# Altium schematic symbol library HSS 2026 Sematik Kutubhane.SchLib: 48 symbols
Pins are listed as number, name and electrical type; pins without a type are passive.

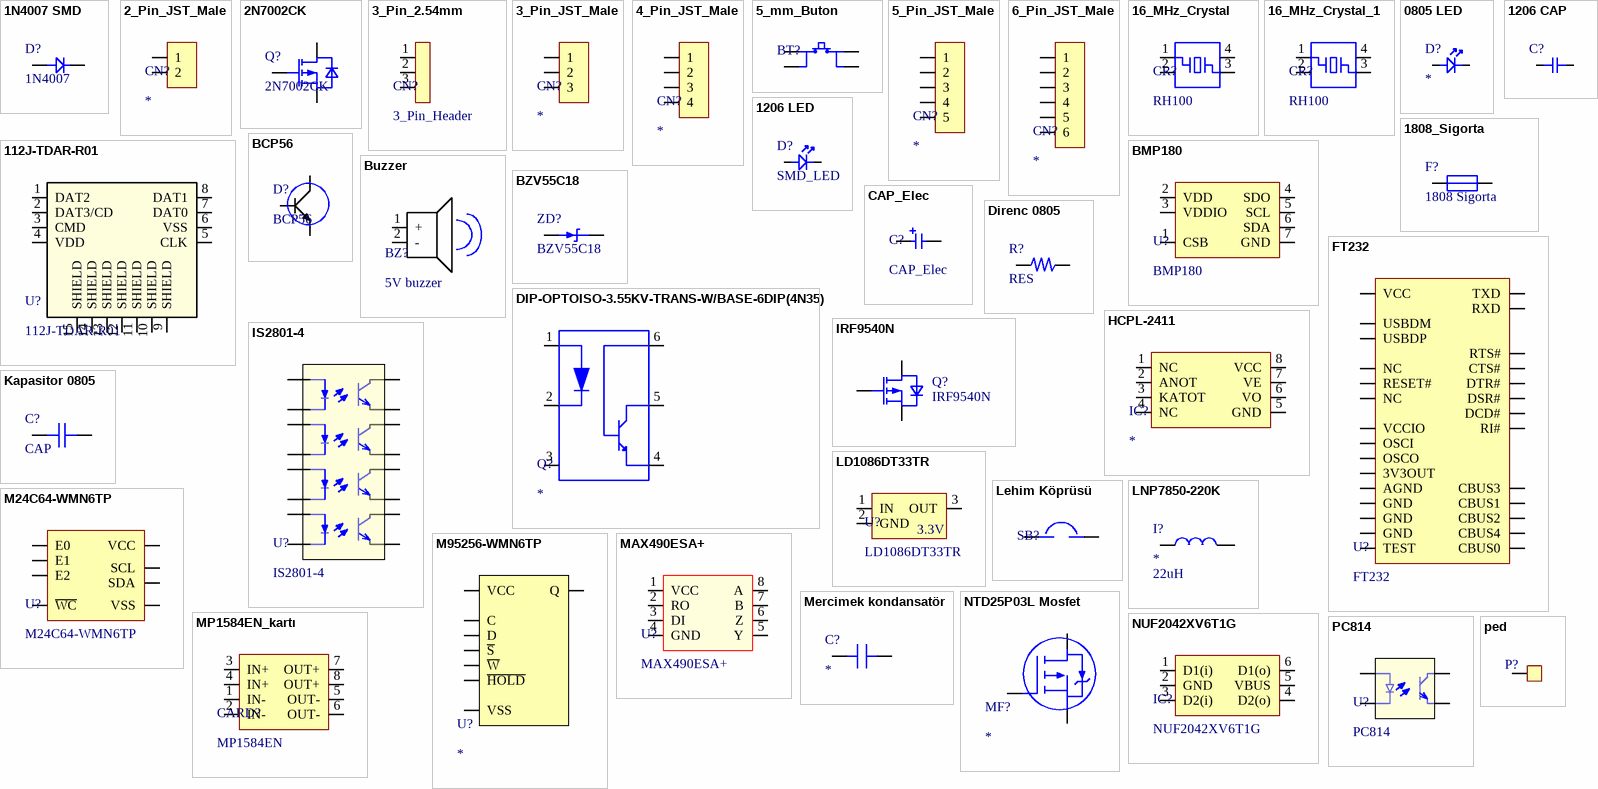
[diagram p0: symbols 1N4007 SMD to ped]

## 1N4007 SMD
designator D?, comment 1N4007
footprint SMB/DO-214AC
pins: 1, 2

## 2_Pin_JST_Male
designator CN?
footprint 2_Pin_JST_Male
pins: 1, 2

## 2N7002CK
designator Q?
footprint SOT-23TO-236_318-08_ONS
pins: 1 GATE, 2 DRAIN, 3 SOURCE

## 3_Pin_2.54mm
designator CN?, comment 3_Pin_Header
footprint 3_PIN_HEADER
pins: 1, 2, 3

## 3_Pin_JST_Male
designator CN?
footprint 3_Pin_JST_Male
pins: 1, 2, 3

## 4_Pin_JST_Male
designator CN?
footprint 4_Pin_JST_Male
pins: 1, 2, 3, 4

## 5_mm_Buton
designator BT?  (value not drawn)
footprint 5mm_buton
pins: 1, 2, 3, 4

## 5_Pin_JST_Male
designator CN?
footprint 5_Pin_JST_Male
pins: 1, 2, 3, 4, 5

## 6_Pin_JST_Male
designator CN?
footprint 6_Pin_JST_Male
pins: 1, 2, 3, 4, 5, 6

## 16_MHz_Crystal
designator CR?, comment RH100
footprint RH100
pins: 1, 2, 3, 4

## 16_MHz_Crystal_1
designator CR?, comment RH100
footprint RH100
pins: 1, 2, 3, 4

## 112J-TDAR-R01
designator U?
Description; Manufacturer_Name: Attend; Copyright: Copyright (C) 2025 Ultra Librarian. All rights reserved.; Manufacturer_Part_Number: 112J-TDAR-R01; RefDes: RefDes; Type: Type
footprint 112J-TDAR-R01_ATT
pins: 1 DAT2, 2 DAT3/CD, 3 CMD, 4 VDD, 5 CLK, 6 VSS, 7 DAT0, 8 DAT1, 9 SHIELD, 10 SHIELD, 11 SHIELD, 12 SHIELD, 13 SHIELD, 14 SHIELD, 15 SHIELD

## 0805 LED
designator D?
footprint 0805 LED
pins: 1, 2

## 1206 CAP
designator C?
footprint 1206_Kapasitör
pins: 1, 2

## 1206 LED
designator D?, comment SMD_LED
footprint 1206_LED
pins: 1, 2

## 1808_Sigorta
designator F?, comment 1808 Sigorta
footprint 1808_Sigorta
pins: 1, 2

## BCP56
designator D?
footprint SOT230P700X180-4N
pins: 1 B, 2 C, 3 E

## BMP180
designator U?
footprint BMP180
pins: 1 CSB, 2 VDD, 3 VDDIO, 4 SDO, 5 SCL, 6 SDA, 7 GND

## Buzzer
designator BZ?, comment 5V buzzer
footprint 5v buzer
pins: 1 +, 2 -

## BZV55C18
designator ZD?
footprint Zener_Diyot
pins: 1 A, 2 K

## CAP_Elec
designator C?
Value: *
footprint CAP_Elec
pins: 1, 2

## DIP-OPTOISO-3.55KV-TRANS-W/BASE-6DIP(4N35)
designator Q?
Optoisolator Transistor with Base Output 5000Vrms 1 Channel 6-DIP; MF: Vishay; MP: 4N35; Purchase-URL: https://pricing.snapeda.com/search/part/4N35/?ref=eda; Price: None; SnapEDA_Link: https://www.snapeda.com/parts/4N35/Vishay%20Semiconductor%20Opto%20Division/view-part/579099/?ref=snap; Availability: Good; Value: *; Check_prices: https://www.snapeda.com/parts/4N35/Vishay%20Semiconductor%20Opto%20Division/view-part/579099/?ref=eda; Package: DIP-6 Texas Instruments
footprint DIP6-2.54-7.3X6.5MM
pins: 1 ANODE, 2 CATHODE, 3 NC, 4 EMITER, 5 COLLECTOR, 6 BASE

## Direnc 0805
designator R?, comment RES
footprint 0805 Dırenc
pins: 1, 2

## FT232
designator U?
footprint SSOP-28
pins: 1 TXD, 2 DTR#, 3 RTS#, 4 VCCIO, 5 RXD, 6 RI#, 7 GND, 8 NC, 9 DSR#, 10 DCD#, 11 CTS#, 12 CBUS4, 13 CBUS2, 14 CBUS3, 15 USBDP, 16 USBDM, 17 3V3OUT, 18 GND, 19 RESET#, 20 VCC, 21 GND, 22 CBUS1, 23 CBUS0, 24 NC, 25 AGND, 26 TEST, 27 OSCI, 28 OSCO

## HCPL-2411
designator IC?
footprint DIP8-2.54
pins: 1 NC, 2 ANOT, 3 KATOT, 4 NC, 5 GND, 6 VO, 7 VE, 8 VCC

## IRF9540N
designator Q?
OptiMOS - P2 Power-Transistor, P-channel-Enhancement mode, VDS -30V; Manufacturer: Infineon Technologies; Manufacturer Order NumberManufacturer Order Number: IRF9540N; PackageReference: PG-TO220-3-904
footprint IFX-PG-TO220-3-904-1 (TO,flange mount,2.54 mm pitch, 3 pin, 10.16 mm L X 4.57 mm W X 20.56 mm H body)
pins: 1 GATE, 2 DRAIN, 3 SOURCE

## IS2801-4
designator U?
Description; Manufacturer_Name: Isocom; Copyright: Copyright (C) 2025 Ultra Librarian. All rights reserved.; Manufacturer_Part_Number: IS2801-4; RefDes: RefDes; Type: Type
footprint IS2801-4_ISO
pins: 1, 2, 3, 4, 5, 6, 7, 8, 9, 10, 11, 12, 13, 14, 15, 16

## Kapasitor 0805
designator C?, comment CAP
footprint 0805 Kapasıtor
pins: 1, 2

## LD1086DT33TR
designator U?
footprint DPAK
pins: 1 IN, 2 GND, 3 OUT
text: 3.3V

## Lehim Köprüsü
designator SB?, comment Solder_Bridge  (value not drawn)
footprint Solder_Bridge
pins: 1, 2

## LNP7850-220K
designator I?  value 22uH
footprint LPN7850
pins: 1, 2

## M24C64-WMN6TP
designator U?
Package: None; Price: None; Value: *; MP: M24C64-WMN6TP; Availability: Unavailable
footprint SOIC127P600X175-8N
pins: 1 E0, 2 E1, 3 E2, 4 VSS, 5 SDA, 6 SCL, 7 ~{WC}, 8 VCC

## M95256-WMN6TP
designator U?
EEPROM Memory IC 256Kb (32K x 8) SPI 20 MHz 8-SOIC; MF: STMicroelectronics; MP: M95256-WMN6TP; SnapEDA_Link: https://www.snapeda.com/parts/M95256-WMN6TP/STMicroelectronics/view-part/?ref=snap; Package: SO-8 STMicroelectronics; Value: *; Check_prices: https://www.snapeda.com/parts/M95256-WMN6TP/STMicroelectronics/view-part/?ref=eda
footprint SOIC127P600X175-8N
pins: 1 ~{S}, 2 Q, 3 ~{W}, 4 VSS, 5 D, 6 C, 7 ~{HOLD}, 8 VCC

## MAX490ESA+
designator U?
Low-Power, Slew-Rate-Limited RS-485/RS-422 Transceivers; Manufacturer_Name: Analog Devices Inc; Copyright: Copyright (C) 2026 Ultra Librarian. All rights reserved.; Manufacturer_Part_Number: MAX490ESA+; RefDes: RefDes; Type: Type
footprint 8-SOIC
pins: 1 VCC, 2 RO, 3 DI, 4 GND, 5 Y, 6 Z, 7 B, 8 A

## Mercimek kondansatör
designator C?
footprint Mercimek kondansatör
pins: 1, 2

## MP1584EN_kartı
designator CARD?, comment MP1584EN
footprint MP1584
pins: 1 IN-, 2 IN-, 3 IN+, 4 IN+, 5 OUT-, 6 OUT-, 7 OUT+, 8 OUT+

## NTD25P03L Mosfet
designator MF?
footprint TO252
pins: 1 G, 3 S, 4 D

## NUF2042XV6T1G
designator IC?
footprint SOT-563-6
pins: 1 D1(i), 2 GND, 3 D2(i), 4 D2(o), 5 VBUS, 6 D1(o)

## PC814
designator U?
Description; Manufacturer_Name: Isocom; Manufacturer_Part_Number: IS2801-1; Type: Optoisolators; Copyright: Copyright (C) 2026 Ultra Librarian. All rights reserved.; RefDes: RefDes
footprint SOIC4
pins: 1, 2, 3, 4

## ped
designator P?  (value not drawn)
footprint ped
pins: 1

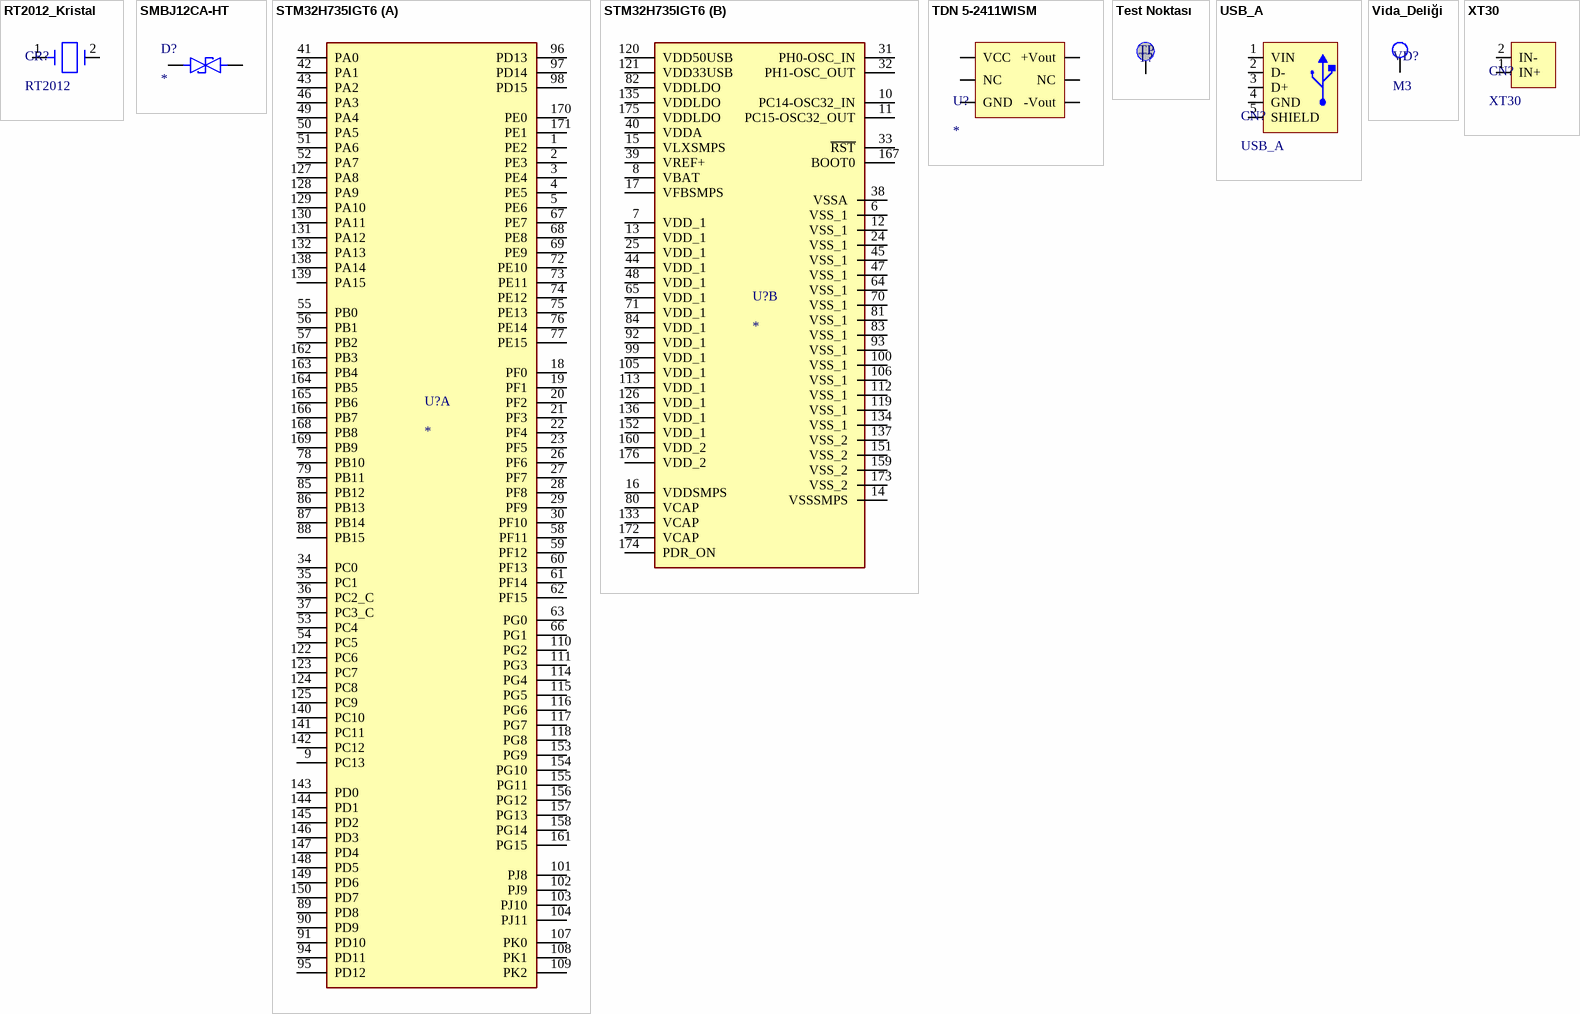
[diagram p1: symbols RT2012_Kristal to XT30]

## RT2012_Kristal
designator CR?, comment RT2012
footprint RT2012
pins: 1, 2

## SMBJ12CA-HT
designator D?
footprint SMB/DO-214AA
pins: 1, 2

## STM32H735IGT6
designator U?
ARM® Cortex®-M7 STM32H7 Microcontroller IC 32-Bit 550MHz 1MB (1M x 8) FLASH 176-LQFP (24x24); MF: STMicroelectronics; MP: STM32H735IGT6; SnapEDA_Link: https://www.snapeda.com/parts/STM32H735IGT6/STMicroelectronics/view-part/?ref=snap; Package: LQFP-176 STMicroelectronics; Value: *; Check_prices: https://www.snapeda.com/parts/STM32H735IGT6/STMicroelectronics/view-part/?ref=eda
footprint LQFP-176
part A pins: 1 PE2, 2 PE3, 3 PE4, 4 PE5, 5 PE6, 9 PC13, 18 PF0, 19 PF1, 20 PF2, 21 PF3, 22 PF4, 23 PF5, 26 PF6, 27 PF7, 28 PF8, 29 PF9, 30 PF10, 34 PC0, 35 PC1, 36 PC2_C, 37 PC3_C, 41 PA0, 42 PA1, 43 PA2, 46 PA3, 49 PA4, 50 PA5, 51 PA6, 52 PA7, 53 PC4, 54 PC5, 55 PB0, 56 PB1, 57 PB2, 58 PF11, 59 PF12, 60 PF13, 61 PF14, 62 PF15, 63 PG0, 66 PG1, 67 PE7, 68 PE8, 69 PE9, 72 PE10, 73 PE11, 74 PE12, 75 PE13, 76 PE14, 77 PE15, 78 PB10, 79 PB11, 85 PB12, 86 PB13, 87 PB14, 88 PB15, 89 PD8, 90 PD9, 91 PD10, 94 PD11, 95 PD12, 96 PD13, 97 PD14, 98 PD15, 101 PJ8, 102 PJ9, 103 PJ10, 104 PJ11, 107 PK0, 108 PK1, 109 PK2, 110 PG2, 111 PG3, 114 PG4, 115 PG5, 116 PG6, 117 PG7, 118 PG8, 122 PC6, 123 PC7, 124 PC8, 125 PC9, 127 PA8, 128 PA9, 129 PA10, 130 PA11, 131 PA12, 132 PA13, 138 PA14, 139 PA15, 140 PC10, 141 PC11, 142 PC12, 143 PD0, 144 PD1, 145 PD2, 146 PD3, 147 PD4, 148 PD5, 149 PD6, 150 PD7, 153 PG9, 154 PG10, 155 PG11, 156 PG12, 157 PG13, 158 PG14, 161 PG15, 162 PB3, 163 PB4, 164 PB5, 165 PB6, 166 PB7, 168 PB8, 169 PB9, 170 PE0, 171 PE1
part B pins: 6 VSS_1, 7 VDD_1, 8 VBAT, 10 PC14-OSC32_IN, 11 PC15-OSC32_OUT, 12 VSS_1, 13 VDD_1, 14 VSSSMPS, 15 VLXSMPS, 16 VDDSMPS, 17 VFBSMPS, 24 VSS_1, 25 VDD_1, 31 PH0-OSC_IN, 32 PH1-OSC_OUT, 33 ~{RST}, 38 VSSA, 39 VREF+, 40 VDDA, 44 VDD_1, 45 VSS_1, 47 VSS_1, 48 VDD_1, 64 VSS_1, 65 VDD_1, 70 VSS_1, 71 VDD_1, 80 VCAP, 81 VSS_1, 82 VDDLDO, 83 VSS_1, 84 VDD_1, 92 VDD_1, 93 VSS_1, 99 VDD_1, 100 VSS_1, 105 VDD_1, 106 VSS_1, 112 VSS_1, 113 VDD_1, 119 VSS_1, 120 VDD50USB, 121 VDD33USB, 126 VDD_1, 133 VCAP, 134 VSS_1, 135 VDDLDO, 136 VDD_1, 137 VSS_2, 151 VSS_2, 152 VDD_1, 159 VSS_2, 160 VDD_2, 167 BOOT0, 172 VCAP, 173 VSS_2, 174 PDR_ON, 175 VDDLDO, 176 VDD_2

## TDN 5-2411WISM
designator U?
footprint Traco 5WISM
pins: 1 VCC, 2 GND, 4 NC, 5 NC, 6 -Vout, 7 +Vout

## Test Noktası
designator T?  (value not drawn)
footprint Test Noktası
pins: 1
text: TP

## USB_A
designator CN?
footprint USB_A
pins: 1 VIN, 2 D-, 3 D+, 4 GND, 5 SHIELD

## Vida_Deliği
designator VD?, comment M3
footprint Vida_Deliği
pins: 1

## XT30
designator CN?
footprint XT30
pins: 1 IN+, 2 IN-